# Altium schematic symbol library Ic%.SchLib: 452 symbols (part 1 of 12)
Pins are listed as number, name and electrical type; pins without a type are passive.

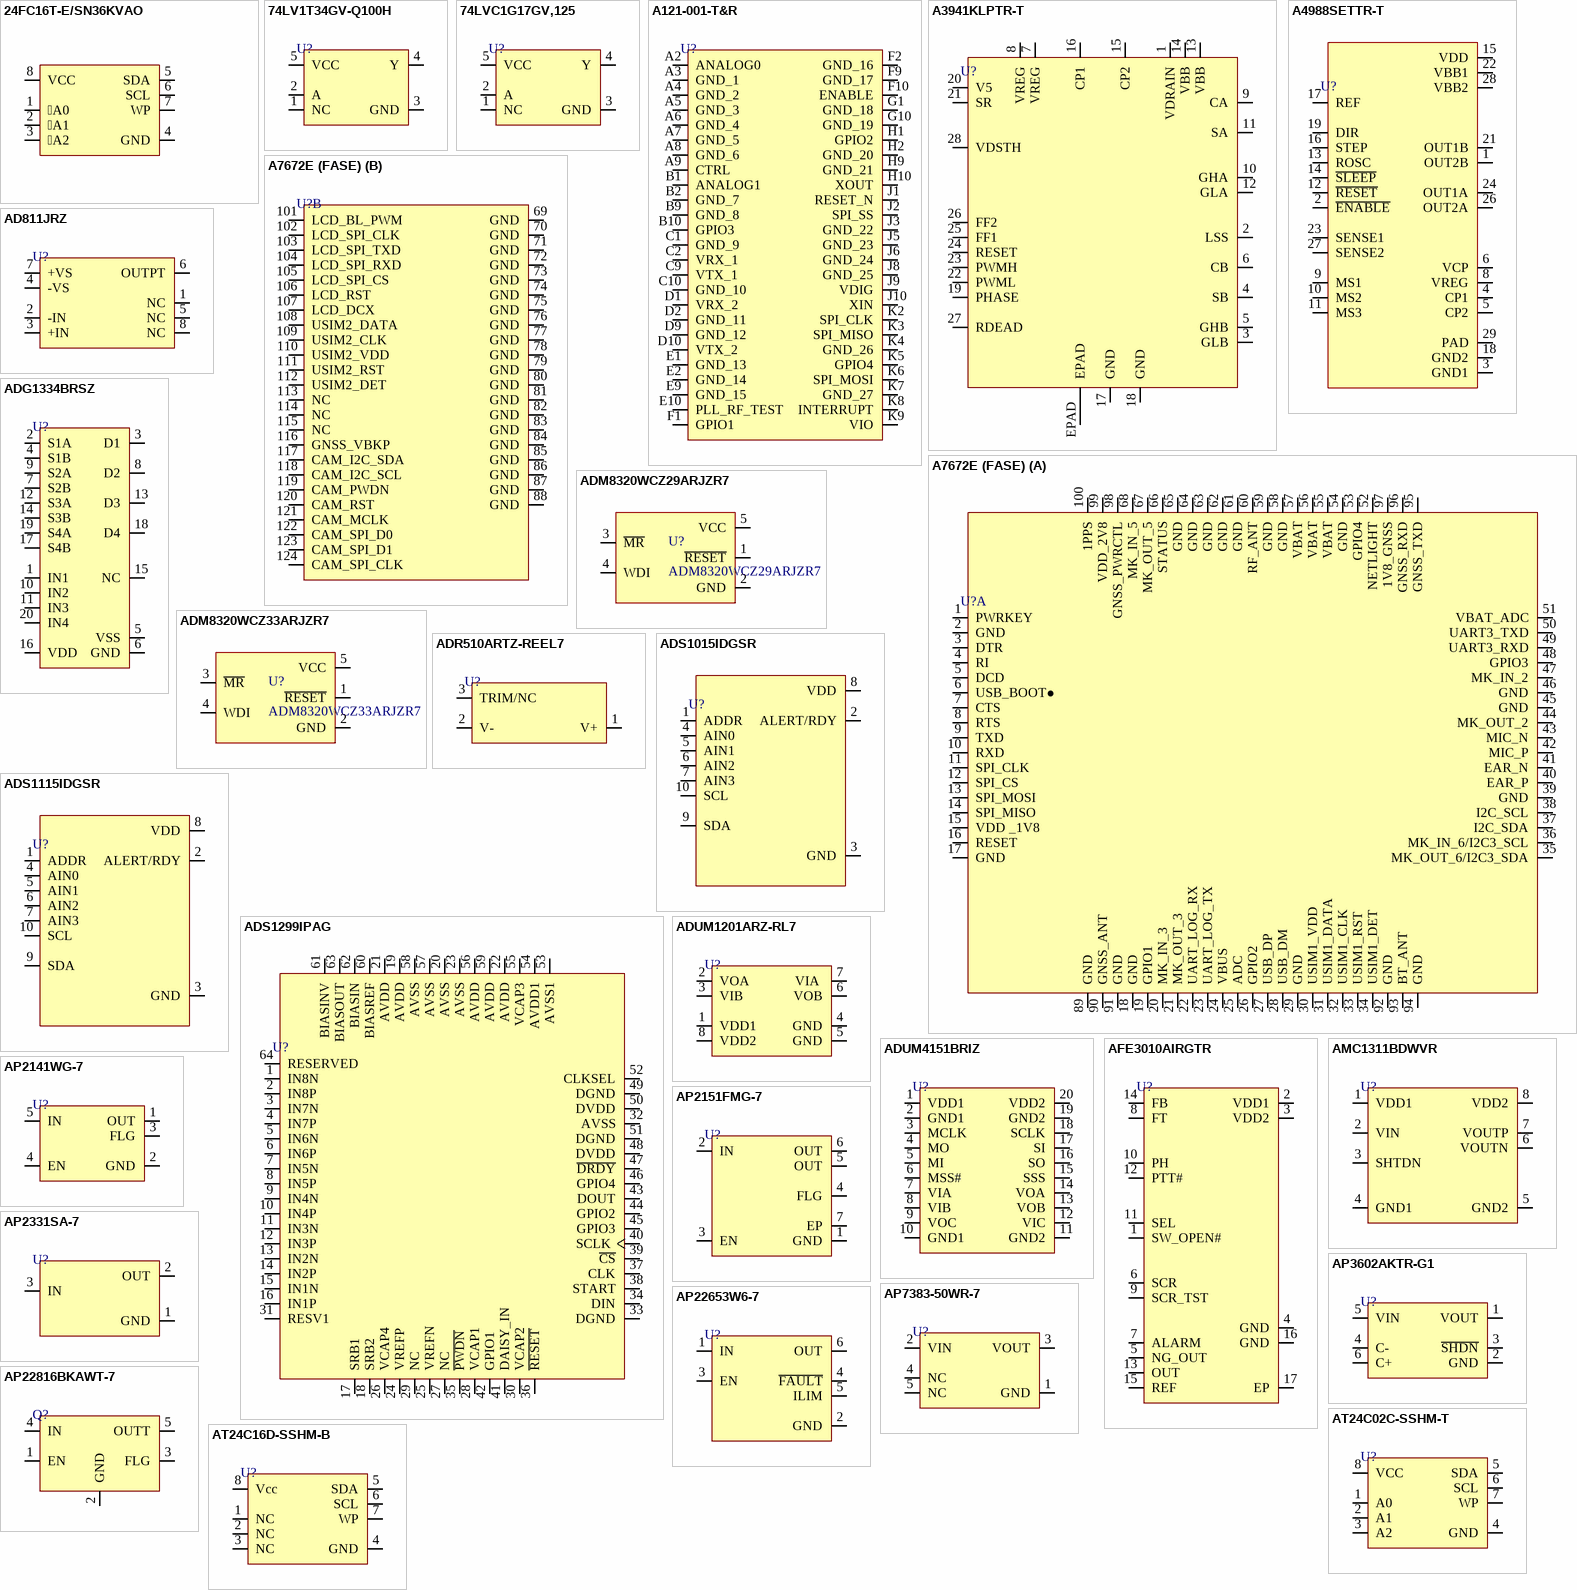
[diagram p0: symbols 24FC16T-E/SN36KVAO to AT24C16D-SSHM-B]

## 24FC16T-E/SN36KVAO
designator U?
IC EEPROM 16KBIT I2C 1MHZ 8SOIC; Item Type: IC; Supplier: DigiKey; Supplier Part Number: 150-24FC16T-E/SN36KVAOTR-ND; ComponentLink2URL: https://datasheet.octopart.com/24FC16T-E-SN36KVAO-Microchip-datasheet-138123575.pdf?src-supplier=Augswan; ComponentLink2Description: https://datasheet.octopart.com/24FC16T-E-SN36KVAO-Microchip-datasheet-138123575.pdf?src-supplier=Augswan
footprint SOIC-8(0.154", 3.90mm Width)
pins: 1 A0, 2 A1, 3 A2, 4 GND, 5 SDA, 6 SCL, 7 WP, 8 VCC

## 74LV1T34GV-Q100H
designator U?
IC BUFFER NON-INVERT 5.5V SC-74A; Manufacturer: Nexperia; Manufacturer Part Number: 74LV1T34GV-Q100H; Manufacturer Lifecycle Status: RELEASED FOR SUPPLY; Load Capacitance: 30pF; Max Supply Current: 10µA; Min Supply Voltage: 1.6V; Number of Channels: 1; Operating Supply Voltage: 5V; Propagation Delay: 5.2ns; Schmitt Trigger Input: No; Supplier: Mouser; Supplier Part Number: 771-74LV1T34GV-Q100H; RoHS: Compliant; Item Type: IC; Stock: 5510; Pricing: 1=0.45, 10=0.304, 50=0.249, 100=0.232, 1000=0.168, 10000=0.132 (USD); China RoHS: Compliant; Contact Plating: Tin; Height - Seated (Max): 1.1mm; Length: 2.9mm; Lifecycle Status: Production; Max Operating Temperature: 125°C; Max Supply Voltage: 5.5V; Min Operating Temperature: -40°C; Number of Circuits: 1; Number of Inputs: 1; Number of Terminals: 5; REACH SVHC: Yes; Schedule B: 8542390000, 8542390000|8542390000|8542390000|8542390000|8542390000|8542390000, 8542390000|8542390000|8542390000|8542390000|8542390000|8542390000|8542390000, 8542390000|8542390000|8542390000|8542390000|8542390000|8542390000|8542390000|8542390000; Terminal Pitch: 950µm; Width: 1.5mm; ComponentLink1URL: https://datasheet.octopart.com:443/74LV1T34GV-Q100H-Nexperia-datasheet-140652209.pdf?src-supplier=IHS; ComponentLink1Description: https://datasheet.octopart.com:443/74LV1T34GV-Q100H-Nexperia-datasheet-140652209.pdf?src-supplier=IHS; ComponentLink2URL: https://datasheet.octopart.com:443/74LV1T34GV-Q100H-Nexperia-datasheet-188911814.pdf?src-supplier=TME; ComponentLink2Description: https://datasheet.octopart.com:443/74LV1T34GV-Q100H-Nexperia-datasheet-188911814.pdf?src-supplier=TME
footprint SC-74A
pins: 1 NC, 2 A, 3 GND, 4 Y, 5 VCC

## 74LVC1G17GV,125
designator U?
IC BUFFER SCHMITT TRIGGER 5TSOP; Manufacturer: Nexperia; Manufacturer Part Number: 74LVC1G17GV,125; Number of Channels: 1NUMBER; Supplier: Future Electronics; Supplier Part Number: 9876707; RoHS: Yes; Category: Logic Gates; Stock: 513000; Pricing: 3000=0.0334, 9000=0.0322, 30000=0.031, 60000=0.0303, 120000=0.029 (USD); Pins: 5NUMBER; Packaging: 10Packaging; RoHS Compliant: Yes; ComponentLink1URL: http://www.farnell.com/datasheets/2185283.pdf?src-supplier=Farnell; ComponentLink1Description: http://www.farnell.com/datasheets/2185283.pdf?src-supplier=Farnell; ComponentLink2URL: https://datasheet.octopart.com/74LVC1G17GV%2C125-Nexperia-datasheet-11799833.pdf?src-supplier=Farnell; ComponentLink2Description: https://datasheet.octopart.com/74LVC1G17GV%2C125-Nexperia-datasheet-11799833.pdf?src-supplier=Farnell; ComponentLink3URL: https://assets.nexperia.com/documents/data-sheet/74LVC1G17.pdf?src-supplier=Digikey; ComponentLink3Description: https://assets.nexperia.com/documents/data-sheet/74LVC1G17.pdf?src-supplier=Digikey; ComponentLink4URL: https://datasheet.octopart.com/74LVC1G17GV%2C125-Nexperia-datasheet-116120530.pdf?src-supplier=Future+Electronics; ComponentLink4Description: https://datasheet.octopart.com/74LVC1G17GV%2C125-Nexperia-datasheet-116120530.pdf?src-supplier=Future+Electronics; ComponentLink5URL: https://datasheet.octopart.com/74LVC1G17GV%2C125-Nexperia-datasheet-73818103.pdf?src-supplier=Element14; ComponentLink5Description: https://datasheet.octopart.com/74LVC1G17GV%2C125-Nexperia-datasheet-73818103.pdf?src-supplier=Element14; ComponentLink6URL: https://datasheet.octopart.com/74LVC1G17GV%2C125-NXP-Semiconductors-datasheet-13026859.pdf?src-supplier=Newark; ComponentLink6Description: https://datasheet.octopart.com/74LVC1G17GV%2C125-NXP-Semiconductors-datasheet-13026859.pdf?src-supplier=Newark; LCSC Part Number: C6076; Item Type: IC
footprint SC-74A
pins: 1 NC, 2 A, 3 GND, 4 Y, 5 VCC

## A121-001-T&R
designator U?
RADAR SENSOR SYSTEM-IN-PACKAGE B; Manufacturer: Acconeer; Manufacturer Part Number: A121-001-T&R; Item Type: IC; Supplier: Mouser; Supplier Part Number: 925-A121-001-T&R; RoHS: No; Category: LDO; Stock: 7442; Pricing: 1=13.72, 10=11.57, 50=10.22, 100=8.78, 1000=7.74, 10000=6.41 (USD)
footprint 50-FCCSP (5.2x5.5)
pins: A2 ANALOG0, A3 GND_1, A4 GND_2, A5 GND_3, A6 GND_4, A7 GND_5, A8 GND_6, A9 CTRL, B1 ANALOG1, B2 GND_7, B9 GND_8, B10 GPIO3, C1 GND_9, C2 VRX_1, C9 VTX_1, C10 GND_10, D1 VRX_2, D2 GND_11, D9 GND_12, D10 VTX_2, E1 GND_13, E2 GND_14, E9 GND_15, E10 PLL_RF_TEST, F1 GPIO1, F2 GND_16, F9 GND_17, F10 ENABLE, G1 GND_18, G10 GND_19, H1 GPIO2, H2 GND_20, H9 GND_21, H10 XOUT, J1 RESET_N, J2 SPI_SS, J3 GND_22, J5 GND_23, J6 GND_24, J8 GND_25, J9 VDIG, J10 XIN, K2 SPI_CLK, K3 SPI_MISO, K4 GND_26, K5 GPIO4, K6 SPI_MOSI, K7 GND_27, K8 INTERRUPT, K9 VIO

## A3941KLPTR-T
designator U?
IC MOTOR DRIVER 5.5V-50V 28TSSOP; Manufacturer: Allegro MicroSystems; Manufacturer Part Number: A3941KLPTR-T; Supplier: Digikey; Supplier Part Number: 620-1236-1-ND; RoHS: Yes; Item Type: IC; Stock: 24636; Pricing: 1=3.93, 10=3.534, 25=3.3404, 100=2.8952, 250=2.74668, 500=2.4646, 1000=2.07858 (USD); ComponentLink1URL: https://datasheet.ciiva.com/1949/a3941-datasheet-1949853.pdf?src-supplier=Digikey; ComponentLink1Description: https://datasheet.ciiva.com/1949/a3941-datasheet-1949853.pdf?src-supplier=Digikey; ComponentLink2URL: https://datasheet.ciiva.com/1949/a3941-datasheet-1949853.pdf?src-supplier=Avnet; ComponentLink2Description: https://datasheet.ciiva.com/1949/a3941-datasheet-1949853.pdf?src-supplier=Avnet; ComponentLink3URL: https://datasheet.ciiva.com/15110/getdatasheetpartid-292391-15110112.pdf?src-supplier=Verical; ComponentLink3Description: https://datasheet.ciiva.com/15110/getdatasheetpartid-292391-15110112.pdf?src-supplier=Verical; ComponentLink4URL: https://datasheet.ciiva.com/6807/1481248-6807185.pdf?src-supplier=Newark; ComponentLink4Description: https://datasheet.ciiva.com/6807/1481248-6807185.pdf?src-supplier=Newark
footprint 28-TSSOP-EP
pins: 1 VDRAIN, 2 LSS, 3 GLB, 4 SB, 5 GHB, 6 CB, 7 VREG, 8 VREG, 9 CA, 10 GHA, 11 SA, 12 GLA, 13 VBB, 14 VBB, 15 CP2, 16 CP1, 17 GND, 18 GND, 19 PHASE, 20 V5, 21 SR, 22 PWML, 23 PWMH, 24 RESET, 25 FF1, 26 FF2, 27 RDEAD, 28 VDSTH, EPAD

## A4988SETTR-T
designator U?
IC MTR DRVR BIPOLAR 3-5.5V 28QFN; Manufacturer: Allegro MicroSystems; Manufacturer Part Number: A4988SETTR-T; Forward Current: 1A; Supplier: Digikey; LCSC Part Number: C38437; RoHS: Yes; Item Type: IC; Stock: 15564; Pricing: 1=2.96, 10=2.213, 25=2.0264, 100=1.8214, 250=1.7236, 500=1.66468 (USD); Length: 4.5mm; Height: 1mm; ComponentLink1URL: https://datasheet.ciiva.com/15109/getdatasheetpartid-557828-15109654.pdf?src-supplier=Verical; ComponentLink1Description: https://datasheet.ciiva.com/15109/getdatasheetpartid-557828-15109654.pdf?src-supplier=Verical; ComponentLink2URL: https://datasheet.ciiva.com/1608/a4988-datasheet-1608449.pdf?src-supplier=Newark; ComponentLink2Description: https://datasheet.ciiva.com/1608/a4988-datasheet-1608449.pdf?src-supplier=Newark; ComponentLink3URL: https://datasheet.ciiva.com/1147/1481258-1147170.pdf?src-supplier=Element14; ComponentLink3Description: https://datasheet.ciiva.com/1147/1481258-1147170.pdf?src-supplier=Element14; ComponentLink4URL: https://datasheet.ciiva.com/3229/a4988-datasheet-3229532.pdf?src-supplier=Avnet; ComponentLink4Description: https://datasheet.ciiva.com/3229/a4988-datasheet-3229532.pdf?src-supplier=Avnet
footprint WQFN-28-EP(5x5)
pins: 1 OUT2B, 2 ~{ENABLE}, 3 GND1, 4 CP1, 5 CP2, 6 VCP, 8 VREG, 9 MS1, 10 MS2, 11 MS3, 12 ~{RESET}, 13 ROSC, 14 ~{SLEEP}, 15 VDD, 16 STEP, 17 REF, 18 GND2, 19 DIR, 21 OUT1B, 22 VBB1, 23 SENSE1, 24 OUT1A, 26 OUT2A, 27 SENSE2, 28 VBB2, 29 PAD

## A7672E (FASE)
designator U?
RF TXRX MODULE CELLULAR SMD; Manufacturer: SIMCom Wireless Solutions Limited; Manufacturer Part Number: A7672E (FASE); Item Type: IC Module; Package: 80-SMD Module; ComponentLink1Description: Digikey; ComponentLink1URL: https://www.digikey.com/en/products/detail/simcom-wireless-solutions-limited/A7672E-FASE/15841437
footprint A7672E (FASE)
part A pins: 1 PWRKEY, 2 GND, 3 DTR, 4 RI, 5 DCD, 6 USB_BOOT●, 7 CTS, 8 RTS, 9 TXD, 10 RXD, 11 SPI_CLK, 12 SPI_CS, 13 SPI_MOSI, 14 SPI_MISO, 15 VDD _1V8, 16 RESET, 17 GND, 18 GND, 19 GPIO1, 20 MK_IN_3, 21 MK_OUT_3, 22 UART_LOG_RX, 23 UART_LOG_TX, 24 VBUS, 25 ADC, 26 GPIO2, 27 USB_DP, 28 USB_DM, 29 GND, 30 USIM1_VDD, 31 USIM1_DATA, 32 USIM1_CLK, 33 USIM1_RST, 34 USIM1_DET, 35 MK_OUT_6/I2C3_SDA, 36 MK_IN_6/I2C3_SCL, 37 I2C_SDA, 38 I2C_SCL, 39 GND, 40 EAR_P, 41 EAR_N, 42 MIC_P, 43 MIC_N, 44 MK_OUT_2, 45 GND, 46 GND, 47 MK_IN_2, 48 GPIO3, 49 UART3_RXD, 50 UART3_TXD, 51 VBAT_ADC, 52 NETLIGHT, 53 GPIO4, 54 GND, 55 VBAT, 56 VBAT, 57 VBAT, 58 GND, 59 GND, 60 RF_ANT, 61 GND, 62 GND, 63 GND, 64 GND, 65 GND, 66 STATUS, 67 MK_OUT_5, 68 MK_IN_5, 89 GND, 90 GNSS_ANT, 91 GND, 92 GND, 93 BT_ANT, 94 GND, 95 GNSS_TXD, 96 GNSS_RXD, 97 1V8_GNSS, 98 GNSS_PWRCTL, 99 VDD_2V8, 100 1PPS
part B pins: 69 GND, 70 GND, 71 GND, 72 GND, 73 GND, 74 GND, 75 GND, 76 GND, 77 GND, 78 GND, 79 GND, 80 GND, 81 GND, 82 GND, 83 GND, 84 GND, 85 GND, 86 GND, 87 GND, 88 GND, 101 LCD_BL_PWM, 102 LCD_SPI_CLK, 103 LCD_SPI_TXD, 104 LCD_SPI_RXD, 105 LCD_SPI_CS, 106 LCD_RST, 107 LCD_DCX, 108 USIM2_DATA, 109 USIM2_CLK, 110 USIM2_VDD, 111 USIM2_RST, 112 USIM2_DET, 113 NC, 114 NC, 115 NC, 116 GNSS_VBKP, 117 CAM_I2C_SDA, 118 CAM_I2C_SCL, 119 CAM_PWDN, 120 CAM_RST, 121 CAM_MCLK, 122 CAM_SPI_D0, 123 CAM_SPI_D1, 124 CAM_SPI_CLK

## AD811JRZ
designator U?
Video Amplifier, 1, 140 Mhz, 2500 V/ S, 0 C, 70 C, 100 Ma Rohs Compliant: Yes; Manufacturer: Analog Devices; Manufacturer Part Number: AD811JRZ; Item Type: IC; Supplier: Mouser; Supplier Part Number: 584-AD811JRZ; RoHS: Yes; Category: Amplifiers - Op Amps, Buffer, Instrumentation; Stock: 196; Pricing: 1=12.99, 10=11.94, 25=11.45, 50=11.45, 98=10.09, 100=10.09, 1000=8.97, 10000=8.97 (USD); ComponentLink1URL: https://datasheet.ciiva.com/1134/1610772-1134928.pdf?src-supplier=Element14; ComponentLink1Description: https://datasheet.ciiva.com/1134/1610772-1134928.pdf?src-supplier=Element14; ComponentLink2URL: https://datasheet.ciiva.com/15130/getdatasheetpartid-72911-15130233.pdf?src-supplier=Verical; ComponentLink2Description: https://datasheet.ciiva.com/15130/getdatasheetpartid-72911-15130233.pdf?src-supplier=Verical; ComponentLink3URL: https://datasheet.ciiva.com/1823/ad811-1823927.pdf?src-supplier=Digi-Key; ComponentLink3Description: https://datasheet.ciiva.com/1823/ad811-1823927.pdf?src-supplier=Digi-Key; ComponentLink4URL: https://datasheet.ciiva.com/2972/ad811-2972994.pdf?src-supplier=Avnet; ComponentLink4Description: https://datasheet.ciiva.com/2972/ad811-2972994.pdf?src-supplier=Avnet; LCSC Part Number: *
footprint SOIC-8(0.154", 3.90mm Width)
pins: 1 NC, 2 -IN, 3 +IN, 4 -VS, 5 NC, 6 OUTPT, 7 +VS, 8 NC

## ADG1334BRSZ
designator U?
IC SW SPST-NO/NCX4 200OHM 20SSOP; Manufacturer: Analog Devices; Manufacturer Part Number: ADG1334BRSZ; Throw Configuration: 256Throw Configuration; Drain to Source Resistance: 325R; Supplier: Mouser; LCSC Part Number: C31704; RoHS: Yes; Item Type: IC; Stock: 471; Pricing: 1=5.86, 10=4.23, 50=4.23, 100=3.04, 1000=2.75, 10000=2.68 (USD); Lead Free: 5698LeadFree; ComponentLink1URL: https://datasheet.ciiva.com/16229/adg1334-279279-16229985.pdf?src-supplier=Mouser; ComponentLink1Description: https://datasheet.ciiva.com/16229/adg1334-279279-16229985.pdf?src-supplier=Mouser; ComponentLink2URL: https://datasheet.ciiva.com/2978/adg1334-2978530.pdf?src-supplier=Avnet; ComponentLink2Description: https://datasheet.ciiva.com/2978/adg1334-2978530.pdf?src-supplier=Avnet; ComponentLink3URL: https://datasheet.ciiva.com/15127/getdatasheetpartid-186987-15127378.pdf?src-supplier=Verical; ComponentLink3Description: https://datasheet.ciiva.com/15127/getdatasheetpartid-186987-15127378.pdf?src-supplier=Verical; ComponentLink4URL: https://datasheet.ciiva.com/1170/208077-1170615.pdf?src-supplier=Element14; ComponentLink4Description: https://datasheet.ciiva.com/1170/208077-1170615.pdf?src-supplier=Element14; ComponentLink5URL: https://datasheet.ciiva.com/6638/adg1334-6638827.pdf?src-supplier=Digikey; ComponentLink5Description: https://datasheet.ciiva.com/6638/adg1334-6638827.pdf?src-supplier=Digikey; ComponentLink6URL: https://datasheet.ciiva.com/5797/adg1334-5797183.pdf?src-supplier=Farnell; ComponentLink6Description: https://datasheet.ciiva.com/5797/adg1334-5797183.pdf?src-supplier=Farnell
footprint SSOP-20-208mil
pins: 1 IN1 "Logic Control Input.", 2 S1A "Source Terminal. Can be an input or output.", 3 D1 "Drain Terminal. Can be an input or output.", 4 S1B "Source Terminal. Can be an input or output.", 5 VSS "Most Negative Power Supply Potential in Dual Supplies. In  single-supply applications, it can be connected to ground.", 6 GND "Ground (0 V) Reference.", 7 S2B "Source Terminal. Can be an input or output.", 8 D2 "Drain Terminal. Can be an input or output.", 9 S2A "Source Terminal. Can be an input or output.", 10 IN2 "Logic Control Input.", 11 IN3 "Logic Control Input.", 12 S3A "Source Terminal. Can be an input or output.", 13 D3 "Drain Terminal. Can be an input or output.", 14 S3B "Source Terminal. Can be an input or output.", 15 NC "No Connect.", 16 VDD "Most Positive Power Supply Potential.", 17 S4B "Source Terminal. Can be an input or output.", 18 D4 "Drain Terminal. Can be an input or output.", 19 S4A "Source Terminal. Can be an input or output.", 20 IN4 "Logic Control Input."

## ADM8320WCZ29ARJZR7
designator U?
140ms Active Low 900mV~5.5V 1 SOT-23-5 Supervisors RoHS; Manufacturer: Analog Devices; Price: None; Manufacturer Part Number: ADM8320WCZ29ARJZR7; Value: -; Package: SOT-23-5; LCSC Part Number: C658543
footprint SOT95P280X145-5N
pins: 1 ~{RESET}, 2 GND (power), 3 ~{MR}, 4 WDI, 5 VCC (power)

## ADM8320WCZ33ARJZR7
designator U?
140ms Active Low 900mV~5.5V 1 SOT-23-5 Supervisors RoHS; Manufacturer: Analog Devices; Price: None; Manufacturer Part Number: ADM8320WCZ33ARJZR7; Value: -; Package: SOT-23-5; LCSC Part Number: C658544
footprint SOT95P280X145-5N
pins: 1 ~{RESET}, 2 GND (power), 3 ~{MR}, 4 WDI, 5 VCC (power)

## ADR510ARTZ-REEL7
designator U?
IC VREF SHUNT 0.35% SOT23-3; Manufacturer: Analog Devices; Manufacturer Part Number: ADR510ARTZ-REEL7; Item Type: Voltage References; Supplier: Mouser; Supplier Part Number: 584-ADR510ARTZ-R7; RoHS: Yes; Stock: 28687; Pricing: 1=2.35, 10=2, 50=2, 100=1.69, 1000=1.14, 10000=1.03 (USD); ComponentLink1URL: https://datasheet.ciiva.com/1172/81404-1172803.pdf?src-supplier=Element14; ComponentLink1Description: https://datasheet.ciiva.com/1172/81404-1172803.pdf?src-supplier=Element14; ComponentLink2URL: https://datasheet.ciiva.com/15373/adr510-279234-15373251.pdf?src-supplier=Mouser; ComponentLink2Description: https://datasheet.ciiva.com/15373/adr510-279234-15373251.pdf?src-supplier=Mouser; ComponentLink3URL: https://datasheet.ciiva.com/28474/81404-28474005.pdf?src-supplier=Element14; ComponentLink3Description: https://datasheet.ciiva.com/28474/81404-28474005.pdf?src-supplier=Element14; ComponentLink4URL: https://datasheet.ciiva.com/3235/adr510-3235758.pdf?src-supplier=Avnet; ComponentLink4Description: https://datasheet.ciiva.com/3235/adr510-3235758.pdf?src-supplier=Avnet; ComponentLink5URL: https://datasheet.ciiva.com/3235/adr510-3235291.pdf?src-supplier=Avnet; ComponentLink5Description: https://datasheet.ciiva.com/3235/adr510-3235291.pdf?src-supplier=Avnet; ComponentLink6URL: https://datasheet.ciiva.com/2005/adr510-2005628.pdf?src-supplier=Digikey; ComponentLink6Description: https://datasheet.ciiva.com/2005/adr510-2005628.pdf?src-supplier=Digikey; ComponentLink7URL: https://datasheet.ciiva.com/2005/adr510-2005629.pdf?src-supplier=Digikey; ComponentLink7Description: https://datasheet.ciiva.com/2005/adr510-2005629.pdf?src-supplier=Digikey; ComponentLink8URL: https://datasheet.ciiva.com/2005/adr510-2005630.pdf?src-supplier=Digikey; ComponentLink8Description: https://datasheet.ciiva.com/2005/adr510-2005630.pdf?src-supplier=Digikey
footprint SOT-23 (TRANS NPN 40V 0.6A SOT23)
pins: 1 V+, 2 V-, 3 TRIM/NC

## ADS1015IDGSR
designator U?
IC ADC 12BIT SIGMA-DELTA 10VSSOP; Manufacturer: Texas Instruments; Manufacturer Part Number: ADS1015IDGSR; Operating Supply Voltage: 3.3V; Min Supply Voltage: 2V; Max Supply Voltage: 5.5V; Interface: I2C; Number of Converters: 1; Resolution: 12b; Number of Bits: 12; Sampling Rate: 3.3KS/s; Polarity: Bipolar; Integral Nonlinearity (INL): 0.5LSB; Supply Type: Single; Number of Inputs: 4; Power Dissipation: 900uW; Supplier: Mouser; Supplier Part Number: 595-ADS1015IDGSR; RoHS: Yes; Item Type: IC; Stock: 6946; Pricing: 1=2.68, 10=2.28, 50=2.28, 100=1.98, 1000=1.42, 10000=1.32 (USD); Case/Package: VSSOP; Pins: 10; Contact Plating: Gold; Min Operating Temperature: -40°C; Max Operating Temperature: 125°C; Packaging: Tape and Reel; Package Quantity: 2500; Number of A/D Converters: 1; Number of Elements: 1; Conversion Rate: 3.3KS/s; Max Supply Voltage (DC): 5.5V; Min Supply Voltage (DC): 2V; Series: -; Length: 3mm; Width: 3mm; Height: 1.07mm; Thickness: 1.02mm; Reach SVHC Compliant: No; Lead Free: Lead Free; RoHS Compliant: Yes; ComponentLink1URL: https://datasheet.ciiva.com/14260/sbas473c-14260076.pdf?src-supplier=Avnet; ComponentLink1Description: https://datasheet.ciiva.com/14260/sbas473c-14260076.pdf?src-supplier=Avnet; ComponentLink2URL: https://datasheet.ciiva.com/6662/ads1013-6662716.pdf?src-supplier=Digikey; ComponentLink2Description: https://datasheet.ciiva.com/6662/ads1013-6662716.pdf?src-supplier=Digikey; LCSC Part Number: C193969
footprint VSSOP-10
pins: 1 ADDR, 2 ALERT/RDY, 3 GND, 4 AIN0, 5 AIN1, 6 AIN2, 7 AIN3, 8 VDD, 9 SDA, 10 SCL

## ADS1115IDGSR
designator U?
IC ADC 16BIT SIGMA-DELTA 10VSSOP; Manufacturer: Texas Instruments; Manufacturer Part Number: ADS1115IDGSR; Interface: I2C; Number of Bits: 16; Sampling Rate: 860S/s; Number of A/D Converters: 1; Resolution: 16b; Polarity: Bipolar; Min Supply Voltage: 2V; Max Supply Voltage: 5.5V; Supply Type: Single; Conversion Rate: 0.86KS/s; Number of Inputs: 4; Integral Nonlinearity (INL): 1LSB; Power Dissipation: 900uW; Nominal Supply Current: 150uA; Number of Channels: 2; Supplier: Mouser; Supplier Part Number: 595-ADS1115IDGSR; RoHS: Yes; Category: Analog to Digital Converters (ADCs); Stock: 5925; Pricing: 1=5.44, 10=4.76, 50=4.76, 100=4.01, 1000=2.88, 10000=2.78 (USD); Case/Package: VSSOP; Pins: 10; Contact Plating: Gold; Min Operating Temperature: -40°C; Max Operating Temperature: 125°C; Package Quantity: 2500; Packaging: Tape and Reel; Number of Converters: 1; Max Supply Voltage (DC): 5.5V; Min Supply Voltage (DC): 2V; Series: -; Length: 3mm; Width: 3mm; Height: 1.07mm; Thickness: 1.02mm; Reach SVHC Compliant: No; Lead Free: Lead Free; RoHS Compliant: Yes; ComponentLink1URL: https://datasheet.ciiva.com/4031/47725463s8438921n7713-4031028.pdf?src-supplier=Arrow+Electronics; ComponentLink1Description: https://datasheet.ciiva.com/4031/47725463s8438921n7713-4031028.pdf?src-supplier=Arrow+Electronics; LCSC Part Number: C37593; Item Type: IC
footprint VSSOP-10
pins: 1 ADDR, 2 ALERT/RDY, 3 GND, 4 AIN0, 5 AIN1, 6 AIN2, 7 AIN3, 8 VDD, 9 SDA, 10 SCL

## ADS1299IPAG
designator U?
IC AFE 8 CHAN 24BIT 64TQFP; Manufacturer: Texas Instruments; Manufacturer Part Number: ADS1299IPAG; Power Consumption: 41mW; Supplier: Mouser; LCSC Part Number: C476817; RoHS: Yes; Item Type: IC; Stock: 1661; Pricing: 1=77.46, 10=64.33, 50=60.74, 100=56.93, 1000=56.93, 10000=56.93 (USD); Length: 10mm; Width: 10mm; Height: 1.2mm; Thickness: 1mm; Lead Free: 5697LeadFree; ComponentLink1URL: https://datasheet.ciiva.com/13063/ads1299-224171-13063283.pdf?src-supplier=Mouser; ComponentLink1Description: https://datasheet.ciiva.com/13063/ads1299-224171-13063283.pdf?src-supplier=Mouser; ComponentLink2URL: https://datasheet.ciiva.com/26913/getdatasheetpartid-563195-26913237.pdf?src-supplier=Verical; ComponentLink2Description: https://datasheet.ciiva.com/26913/getdatasheetpartid-563195-26913237.pdf?src-supplier=Verical; ComponentLink3URL: https://datasheet.ciiva.com/6668/ads1299-6668469.pdf?src-supplier=Digikey; ComponentLink3Description: https://datasheet.ciiva.com/6668/ads1299-6668469.pdf?src-supplier=Digikey
footprint 64-TQFP (10x10)
pins: 1 IN8N "Differential analog negative input 8", 2 IN8P "Differential analog positive input 8", 3 IN7N "Differential analog negative input 7", 4 IN7P "Differential analog positive input 7", 5 IN6N "Differential analog negative input 6", 6 IN6P "Differential analog positive input 6", 7 IN5N "Differential analog negative input 5", 8 IN5P "Differential analog positive input 5", 9 IN4N "Differential analog negative input 4", 10 IN4P "Differential analog positive input 4", 11 IN3N "Differential analog negative input 3", 12 IN3P "Differential analog positive input 3", 13 IN2N "Differential analog negative input 2", 14 IN2P "Differential analog positive input 2", 15 IN1N "Differential analog negative input 1", 16 IN1P "Differential analog positive input 1", 17 SRB1 "Patient stimulus, reference, and bias signal 1", 18 SRB2 "Patient stimulus, reference, and bias signal 2", 19 AVDD "Analog supply", 20 AVSS "Analog ground", 21 AVDD "Analog supply", 22 AVDD "Analog supply", 23 AVSS "Analog ground", 24 VREFP "Positive reference voltage", 25 VREFN "Negative reference voltage", 26 VCAP4 "Analog bypass capacitor", 27 NC "No connection", 28 VCAP1 "Analog bypass capacitor", 29 NC "No connection", 30 VCAP2 "Analog bypass capacitor", 31 RESV1 "Reserved for future use. Must tie to logic low (DGND)", 32 AVSS "Analog ground", 33 DGND "Digital ground", 34 DIN "SPI data in", 35 ~{PWDN} "Power-down; active low", 36 ~{RESET} "System reset; active low", 37 CLK "Master clock input", 38 START "Start conversion", 39 ~{CS} "SPI chip select; active low", 40 SCLK "SPI clock", 41 DAISY_IN "Daisy-chain input", 42 GPIO1 "General-purpose input/output pin", 43 DOUT "SPI data out", 44 GPIO2 "General-purpose input/output pin", 45 GPIO3 "GPIO3 in normal mode", 46 GPIO4 "GPIO4 in normal mode", 47 ~{DRDY} "Data ready; active low", 48 DVDD "Digital power supply", 49 DGND "Digital ground", 50 DVDD "Digital power supply", 51 DGND "Digital ground", 52 CLKSEL "Master clock select", 53 AVSS1 "Analog ground", 54 AVDD1 "Analog supply", 55 VCAP3 "Analog bypass capacitor", 56 AVDD "Analog supply", 57 AVSS "Analog ground", 58 AVSS "Charge pump analog ground", 59 AVDD "Charge pump analog supply", 60 BIASREF "Bias drive noninverting input", 61 BIASINV "Bias drive inverting input", 62 BIASIN "Bias drive input to MUX", 63 BIASOUT "Bias drive output", 64 RESERVED "Leave as open circuit"

## ADUM1201ARZ-RL7
designator U?
DGTL ISO 2500VRMS 2CH GP 8SOIC; Manufacturer: Analog Devices; Manufacturer Part Number: ADUM1201ARZ-RL7; Number of Channels: 2; Propagation Delay: 150ns; Min Supply Voltage: 2.7V; Max Supply Voltage: 5.5V; Data Rate: 25Mbps; Channel Type: Unidirectional; Polarity: Bidirectional; Operating Supply Current: 600uA; ESD Protection: No; Output Current: 35mA; Pulse Width Distortion (PWD): 40ns; Voltage: 5V; Approvals: UL,CSA,VDE; Item Type: IC; Supplier: Mouser; Supplier Part Number: 584-ADUM1201ARZ-R7; RoHS: Yes; Category: Interface ICs; Stock: 39953; Pricing: 1=4.14, 10=3.72, 50=3.72, 100=3.05, 1000=2.19, 10000=2.08 (USD); Case/Package: R; Pins: 8; Weight: 0.019048oz; Min Operating Temperature: -40°C; Max Operating Temperature: 125°C; Packaging: Tape and Reel; Turn-On Delay Time: 150ns; Isolated Power: No; Type: General Purpose; Max Supply Current: 600uA; Series: iCoupler®; Radiation Hardening: No; Lead Free: Contains Lead; RoHS Compliant: Yes; ComponentLink1URL: https://datasheet.ciiva.com/15119/getdatasheetpartid-121048-15119389.pdf?src-supplier=Verical; ComponentLink1Description: https://datasheet.ciiva.com/15119/getdatasheetpartid-121048-15119389.pdf?src-supplier=Verical; ComponentLink2URL: https://datasheet.ciiva.com/3149/adum1200-1201-3149740.pdf?src-supplier=Avnet; ComponentLink2Description: https://datasheet.ciiva.com/3149/adum1200-1201-3149740.pdf?src-supplier=Avnet; ComponentLink3URL: https://datasheet.ciiva.com/15367/adum1200-1201-279454-15367752.pdf?src-supplier=Mouser; ComponentLink3Description: https://datasheet.ciiva.com/15367/adum1200-1201-279454-15367752.pdf?src-supplier=Mouser; LCSC Part Number: C9669
footprint SOIC-8(0.154", 3.90mm Width)
pins: 1 VDD1, 2 VOA, 3 VIB  , 4 GND, 5 GND, 6 VOB, 7 VIA , 8 VDD2

## ADUM4151BRIZ
designator U?
DGTL ISOLTR 5KV 7CH SPI 20-SOIC; Manufacturer: Analog Devices; Manufacturer Part Number: ADUM4151BRIZ; Manufacturer Lifecycle Status: PRODUCTION; Item Type: IC; Channel Type: Unidirectional; Data Rate: 34Mbps; Isolated Power: No; Max Input Current: 18mA; Max Power Dissipation: 2.4W; Max Supply Voltage: 5.5V; Min Supply Voltage: 3V; Number of Channels: 7; Polarity: Bidirectional; Propagation Delay: 14ns; Pulse Width Distortion (PWD): 2ns; Rise Time: 2.5ns; Supplier: Arrow Electronics; LCSC Part Number: C660954; RoHS: Compliant; Stock: 15; Pricing: 62=7.191, 124=6.824, 279=6.74 (USD); Case/Package: SOIC; Depth: 2.44mm; Height: 2.64mm; Interface: SPI; Isolation Voltage: 5kV; Lead Free: Contains Lead; Length: 15.4mm; Lifecycle Status: Production; Max Operating Temperature: 125°C; Min Operating Temperature: -40°C; Mounting Technology: Surface Mount; Pins: 20; Schedule B: 8542390000, 8542390000|8542390000|8542390000|8542390000|8542390000|8542390000|8542390000|8542390000|8542390000|8542390000|8542390000|8542390000|8542390000|8542390000|8542390000|8542390000|8542390000|8542390000|8542390000|8542390000|8542390000|8542390000|8542390000|85; Turn-On Delay Time: 14ns; Weight: 800.987426mg; Width: 7.6mm; ComponentLink1URL: https://octopart.com:443/opatz8j6/c1?t=qGup1W_oBSPcG--iJc4zhXYaAMGcTXzYaxoxPo0HrFuqKJ8NS3XBQL2t5GeTOrjnzAiWj4fWW59-InhBeS5ARLwXR9-CHwOr-TK-vGiUfgZurmNtEGh60lBxqOCmde21OAyXD_79k6b3Ox7mJLOMI69Oq5tQ-gbSpeSv54Vsr6vhNVZ_6f_FBK5DFgVZMWLT-wT60cBOJ0tSznrAe3-6Yi-aSdOpRLVW5ryzTyM44QzPx3wRz9cQx9L3ALJP0EyTwFcv31dMyeZSUSxmT-9n9F2WltHHeCOdJqmYWuTV1WBcvwcyezqS1eRb&src-supplier=Analog+Devices; ComponentLink1Description: https://octopart.com:443/opatz8j6/c1?t=qGup1W_oBSPcG--iJc4zhXYaAMGcTXzYaxoxPo0HrFuqKJ8NS3XBQL2t5GeTOrjnzAiWj4fWW59-InhBeS5ARLwXR9-CHwOr-TK-vGiUfgZurmNtEGh60lBxqOCmde21OAyXD_79k6b3Ox7mJLOMI69Oq5tQ-gbSpeSv54Vsr6vhNVZ_6f_FBK5DFgVZMWLT-wT60cBOJ0tSznrAe3-6Yi-aSdOpRLVW5ryzTyM44QzPx3wRz9cQx9L3ALJP0EyTwFcv31dMyeZSUSxmT-9n9F2WltHHeCOdJqmYWuTV1WBcvwcyezqS1eRb&src-supplier=Analog+Devices; ComponentLink2URL: https://datasheet.octopart.com:443/ADUM4151BRIZ-Analog-Devices-datasheet-32031388.pdf?src-supplier=Analog+Devices; ComponentLink2Description: https://datasheet.octopart.com:443/ADUM4151BRIZ-Analog-Devices-datasheet-32031388.pdf?src-supplier=Analog+Devices; ComponentLink3URL: https://datasheet.octopart.com:443/ADUM4151BRIZ-Analog-Devices-datasheet-155132992.pdf?src-supplier=element14+APAC; ComponentLink3Description: https://datasheet.octopart.com:443/ADUM4151BRIZ-Analog-Devices-datasheet-155132992.pdf?src-supplier=element14+APAC; ComponentLink4URL: https://datasheet.octopart.com:443/ADUM4151BRIZ-Analog-Devices-datasheet-39075007.pdf?src-supplier=Newark; ComponentLink4Description: https://datasheet.octopart.com:443/ADUM4151BRIZ-Analog-Devices-datasheet-39075007.pdf?src-supplier=Newark; ComponentLink5URL: https://datasheet.octopart.com:443/ADUM4151BRIZ-Analog-Devices-datasheet-34433195.pdf?src-supplier=Newark; ComponentLink5Description: https://datasheet.octopart.com:443/ADUM4151BRIZ-Analog-Devices-datasheet-34433195.pdf?src-supplier=Newark; ComponentLink6URL: https://sigma.octopart.com:443/155132993/technical_drawing/Analog-Devices-ADUM4151BRIZ.pdf?src-supplier=Upverter; ComponentLink6Description: https://sigma.octopart.com:443/155132993/technical_drawing/Analog-Devices-ADUM4151BRIZ.pdf?src-supplier=Upverter; ComponentLink7URL: http://sigma.octopart.com:80/conflict_mineral_statement/Analog-Devices-company-33.pdf?src-supplier=Compliance+Statements; ComponentLink7Description: http://sigma.octopart.com:80/conflict_mineral_statement/Analog-Devices-company-33.pdf?src-supplier=Compliance+Statements; ComponentLink8URL: https://octopart.com:443/opatz8j6/c1?t=-zuXzVPEif_oBOBz7mrKPXpwWpUbZyB3b-5gW-5dlJhHF72wdTzRfVpyfGTJblaM7IAHJmSKMSiooT2ReCf8cLMR9vGSAKLMIed9YImrucLmmdfP9yCJWnCCrBPEI21wskbWC7pG-qeM6rysXQDCKOZXUmpZGSozPQy54PkdlKq0qYAZxeRL_ck5zPm9l0FnKkugaBla7BFZd9ay3dmyCwfR8LWzrnIe1wkJ5xvtf7NOIoEq-xu--yn1Hkx5IUluIi2QOdxXOsHMV_2ni7WwiZAPY5lkOvy13CqkEzRtrU-6e5frNiJr9e5H&src-supplier=Compliance+Statements; ComponentLink8Description: https://octopart.com:443/opatz8j6/c1?t=-zuXzVPEif_oBOBz7mrKPXpwWpUbZyB3b-5gW-5dlJhHF72wdTzRfVpyfGTJblaM7IAHJmSKMSiooT2ReCf8cLMR9vGSAKLMIed9YImrucLmmdfP9yCJWnCCrBPEI21wskbWC7pG-qeM6rysXQDCKOZXUmpZGSozPQy54PkdlKq0qYAZxeRL_ck5zPm9l0FnKkugaBla7BFZd9ay3dmyCwfR8LWzrnIe1wkJ5xvtf7NOIoEq-xu--yn1Hkx5IUluIi2QOdxXOsHMV_2ni7WwiZAPY5lkOvy13CqkEzRtrU-6e5frNiJr9e5H&src-supplier=Compliance+Statements
footprint SOIC-20-300mil
pins: 1 VDD1, 2 GND1, 3 MCLK, 4 MO, 5 MI, 6 MSS#, 7 VIA, 8 VIB, 9 VOC, 10 GND1, 11 GND2, 12 VIC, 13 VOB, 14 VOA, 15 SSS, 16 SO, 17 SI, 18 SCLK, 19 GND2, 20 VDD2

## AFE3010AIRGTR
designator U?
IC GRND FAULT CIRC INTER 16-VQFN; Manufacturer: Texas Instruments; Manufacturer Part Number: AFE3010AIRGTR; Supplier: Mouser; LCSC Part Number: C17533396; RoHS: Yes; Item Type: IC; Stock: 1960; Pricing: 1=1.66, 10=1.61, 50=1.61, 100=1.61, 1000=1.23, 10000=0.749 (USD)
footprint VQFN-16(3x3)
pins: 1 SW_OPEN#, 2 VDD1, 3 VDD2, 4 GND, 5 NG_OUT, 6 SCR, 7 ALARM, 8 FT, 9 SCR_TST, 10 PH, 11 SEL, 12 PTT#, 13 OUT, 14 FB, 15 REF, 16 GND, 17 EP

## AMC1311BDWVR
designator U?
IC ISOLATION 8SOIC; Manufacturer: Texas Instruments; Manufacturer Part Number: AMC1311BDWVR; Supplier: Mouser; Supplier Part Number: 595-AMC1311BDWVR; RoHS: Yes; Item Type: IC; Stock: 12443; Pricing: 1=6.01, 10=5.43, 50=5.18, 100=4.5, 1000=3.41, 10000=3.29 (USD); Length: 5.85mm; Width: 7.5mm; Height: 2.8mm; Thickness: 2.65mm; ComponentLink1URL: http://www.ti.com/general/docs/suppproductinfo.tsp?distId=10&amp;gotoUrl=http%3A%2F%2Fwww.ti.com%2Flit%2Fgpn%2Famc1311&src-supplier=Digikey; ComponentLink1Description: http://www.ti.com/general/docs/suppproductinfo.tsp?distId=10&amp;gotoUrl=http%3A%2F%2Fwww.ti.com%2Flit%2Fgpn%2Famc1311&src-supplier=Digikey; ComponentLink2URL: http://www.ti.com/lit/ds/symlink/amc1311.pdf?src-supplier=Digikey; ComponentLink2Description: http://www.ti.com/lit/ds/symlink/amc1311.pdf?src-supplier=Digikey; LCSC Part Number: C783598
footprint SOIC-8-300mil
pins: 1 VDD1, 2 VIN, 3 SHTDN, 4 GND1, 5 GND2, 6 VOUTN, 7 VOUTP, 8 VDD2

## AP2141WG-7
designator U?
IC PWR SWITCH P-CHAN 1:1 SOT25; Manufacturer: Diodes; Manufacturer Part Number: AP2141WG-7; Number of Outputs: 1; Max Supply Voltage: 5.5V; Min Supply Voltage: 2.7V; Interface: On/Off; Max Output current: 500mA; Fault Protection: Over Temperature,Reverse Current; Output Configuration: High Side; Max Current Rating: 800mA; On-state Resistance-Max: 120MR; Supplier: Future Electronics; Supplier Part Number: 6000118; RoHS: Yes; Category: Hot Swap Controllers; Stock: 39000; Pricing: 3000=0.33, 6000=0.325, 9000=0.32, 12000=0.32, 15000=0.31, 30000=0.21, 60000=0.205 (USD); Mounting Technology: Surface Mount; Case/Package: SOT-25; Pins: 5; Min Operating Temperature: -40°C; Max Operating Temperature: 85°C; Package Quantity: 3000; Packaging: Tape and Reel; Voltage: 5.5V; Current: 500mA; Series: -; Number of Switches: 1; Length: 3.1mm; Width: 1.7mm; Height: 1.3mm; Radiation Hardening: No; Lead Free: Lead Free; RoHS Compliant: Yes; ComponentLink1URL: https://datasheet.ciiva.com/15108/getdatasheetpartid-145053-15108419.pdf?src-supplier=Verical; ComponentLink1Description: https://datasheet.ciiva.com/15108/getdatasheetpartid-145053-15108419.pdf?src-supplier=Verical; ComponentLink2URL: https://datasheet.ciiva.com/1962/ap2141-51-1962222.pdf?src-supplier=Digi-Key; ComponentLink2Description: https://datasheet.ciiva.com/1962/ap2141-51-1962222.pdf?src-supplier=Digi-Key; ComponentLink3URL: https://datasheet.ciiva.com/1962/ap2141-51-1962223.pdf?src-supplier=Digi-Key; ComponentLink3Description: https://datasheet.ciiva.com/1962/ap2141-51-1962223.pdf?src-supplier=Digi-Key; ComponentLink4URL: https://datasheet.ciiva.com/1962/ap2141-51-1962221.pdf?src-supplier=Digi-Key; ComponentLink4Description: https://datasheet.ciiva.com/1962/ap2141-51-1962221.pdf?src-supplier=Digi-Key; LCSC Part Number: C500761; Item Type: IC
footprint SOT-23-5
pins: 1 OUT, 2 GND, 3 FLG, 4 EN, 5 IN

## AP2151FMG-7
designator U?
IC PWR SWITCH P-CHANNEL 1:1 6DFN; Manufacturer: Diodes; Manufacturer Part Number: AP2151FMG-7; Number of Channels: 1NUMBER; Value: 120mR; Supplier: Arrow Electronics; LCSC Part Number: C154891; RoHS: Yes; Item Type: IC; Stock: 9000; Pricing: 3000=0.174, 6000=0.1607 (USD); Lead Free: 5697LeadFree; ComponentLink1URL: https://datasheet.ciiva.com/15108/getdatasheetpartid-697404-15108898.pdf?src-supplier=Verical; ComponentLink1Description: https://datasheet.ciiva.com/15108/getdatasheetpartid-697404-15108898.pdf?src-supplier=Verical
footprint UDFN2018-6
pins: 1 GND, 2 IN, 3 EN, 4 FLG, 5 OUT, 6 OUT, 7 EP

## AP2331SA-7
designator U?
IC CURRENT SWITCH SOT23-3; Manufacturer: Diodes; Manufacturer Part Number: AP2331SA-7; Supplier: Digikey; Supplier Part Number: AP2331SA-7DICT-ND; RoHS: Yes; Category: Hot Swap Controllers; Stock: 19607; Pricing: 1=0.45, 10=0.383, 25=0.3572, 100=0.2859, 250=0.26548, 500=0.22464, 1000=0.17359 (USD); ComponentLink1URL: https://datasheet.ciiva.com/15108/getdatasheetpartid-670771-15108880.pdf?src-supplier=Verical; ComponentLink1Description: https://datasheet.ciiva.com/15108/getdatasheetpartid-670771-15108880.pdf?src-supplier=Verical; ComponentLink2URL: https://datasheet.ciiva.com/4923/ap2331-6844-4923636.pdf?src-supplier=Mouser; ComponentLink2Description: https://datasheet.ciiva.com/4923/ap2331-6844-4923636.pdf?src-supplier=Mouser; ComponentLink3URL: https://datasheet.ciiva.com/8142/ap2331-8142774.pdf?src-supplier=Avnet; ComponentLink3Description: https://datasheet.ciiva.com/8142/ap2331-8142774.pdf?src-supplier=Avnet; ComponentLink4URL: https://datasheet.ciiva.com/1962/ap2331-1962167.pdf?src-supplier=Digikey; ComponentLink4Description: https://datasheet.ciiva.com/1962/ap2331-1962167.pdf?src-supplier=Digikey; ComponentLink5URL: https://datasheet.ciiva.com/1962/ap2331-1962168.pdf?src-supplier=Digikey; ComponentLink5Description: https://datasheet.ciiva.com/1962/ap2331-1962168.pdf?src-supplier=Digikey; ComponentLink6URL: https://datasheet.ciiva.com/1962/ap2331-1962169.pdf?src-supplier=Digikey; ComponentLink6Description: https://datasheet.ciiva.com/1962/ap2331-1962169.pdf?src-supplier=Digikey; LCSC Part Number: C500764; Item Type: IC
footprint SOT-23 (TRANS NPN 40V 0.6A SOT23)
pins: 1 GND, 2 OUT, 3 IN

## AP3602AKTR-G1
designator U?
IC LED DRVR RGLTR 100MA SOT23-6; Manufacturer: Diodes; Manufacturer Part Number: AP3602AKTR-G1; Item Type: LED Drivers; Supplier: Digikey; Supplier Part Number: 31-AP3602AKTR-G1CT-ND; RoHS: Yes; Stock: 4893; Pricing: 1=0.48, 10=0.414, 25=0.386, 100=0.3088, 250=0.28676, 500=0.24264, 1000=0.1875 (USD); ComponentLink1URL: https://media.digikey.com/pdf/Data%20Sheets/Diodes%20PDFs/AP3602A_B.pdf?src-supplier=Digikey; ComponentLink1Description: https://media.digikey.com/pdf/Data%20Sheets/Diodes%20PDFs/AP3602A_B.pdf?src-supplier=Digikey; LCSC Part Number: C460358
footprint SOT-23-6
pins: 1 VOUT, 2 GND, 3 ~{SHDN}, 4 C-, 5 VIN, 6 C+

## AP7383-50WR-7
designator U?
IC REG LIN 5V 150MA SOT25 T&R 3K; Manufacturer: Diodes; Manufacturer Part Number: AP7383-50WR-7; Supplier: Digikey; Supplier Part Number: AP7383-50WR-7-ND; RoHS: Yes; Stock: 3000; Pricing: 3000=0.11632, 6000=0.10927, 15000=0.10222, 30000=0.09376, 75000=0.09024 (USD); ComponentLink1URL: https://www.diodes.com/assets/Datasheets/AP7383.pdf?src-supplier=Digikey; ComponentLink1Description: https://www.diodes.com/assets/Datasheets/AP7383.pdf?src-supplier=Digikey; ComponentLink2URL: https://datasheet.octopart.com/AP7383-50WR-7-Diodes-Inc.-datasheet-145414615.pdf?src-supplier=Farnell; ComponentLink2Description: https://datasheet.octopart.com/AP7383-50WR-7-Diodes-Inc.-datasheet-145414615.pdf?src-supplier=Farnell; LCSC Part Number: C460413; Item Type: IC
footprint SOT-23-5
pins: 1 GND, 2 VIN, 3 VOUT, 4 NC, 5 NC

## AP22653W6-7
designator U?
Power Switch/Driver 1:1 P-Channel 2.1A SOT-26; Manufacturer: Diodes; Manufacturer Part Number: AP22653W6-7; Item Type: USB Interface ICs; Interface: On/Off; Fault Protection: Over Voltage,Over Temperature,Short Circuit,Reverse Current; Number of Outputs: 1; Output Configuration: High Side; Max Supply Voltage: 5.5V; Min Supply Voltage: 3V; Number of Channels: 1NUMBER; Supplier: Avnet; LCSC Part Number: C2158037; RoHS: Yes; Stock: 150000; Pricing: 3000=0.1127, 6000=0.11213, 12000=0.11155, 18000=0.11098, 24000=0.1104 (USD); Mounting Technology: Surface Mount; Case/Package: SOT-23-6; Min Operating Temperature: -40°C; Max Operating Temperature: 85°C; Series: -; Max Output current: 2.1A; Output Current: 2.1A; Height: 1.4mm; ComponentLink1URL: https://datasheet.octopart.com/AP22653W6-7-Diodes-Inc.-datasheet-151209788.pdf?src-supplier=Future+Electronics; ComponentLink1Description: https://datasheet.octopart.com/AP22653W6-7-Diodes-Inc.-datasheet-151209788.pdf?src-supplier=Future+Electronics; ComponentLink2URL: https://www.diodes.com/assets/Datasheets/AP22652_53_52A_53A.pdf?src-supplier=Digikey; ComponentLink2Description: https://www.diodes.com/assets/Datasheets/AP22652_53_52A_53A.pdf?src-supplier=Digikey
footprint SOT-26
pins: 1 IN, 2 GND, 3 EN, 4 ~{FAULT}, 5 ILIM, 6 OUT

## AP22816BKAWT-7
designator Q?
USBPOWERSWITCHTSOT25T&R3K; Manufacturer: Diodes; Manufacturer Part Number: AP22816BKAWT-7; Item Type: IC; Number of Channels: 1NUMBER; Supplier: Digikey; Supplier Part Number: 31-AP22816BKAWT-7CT-ND; RoHS: No; Stock: 8685; Pricing: 1=0.31, 10=0.248, 25=0.2264, 100=0.1686, 250=0.15276, 500=0.12644, 1000=0.09483 (USD)
footprint TSOT-25
pins: 1 EN, 2 GND, 3 FLG, 4 IN, 5 OUTT

## AT24C02C-SSHM-T
designator U?
IC EEPROM 2KBIT I2C 1MHZ 8SOIC; Manufacturer: Microchip; Manufacturer Part Number: AT24C02C-SSHM-T; Supplier: Digikey; LCSC Part Number: C6203; RoHS: Yes; Item Type: IC; Pricing: 1=0.25, 100=0.2369 (USD); ComponentLink1URL: https://datasheet.ciiva.com/5700/1626965-5700961.pdf?src-supplier=Farnell; ComponentLink1Description: https://datasheet.ciiva.com/5700/1626965-5700961.pdf?src-supplier=Farnell; ComponentLink2URL: https://datasheet.ciiva.com/15123/getdatasheetpartid-257563-15123318.pdf?src-supplier=Verical; ComponentLink2Description: https://datasheet.ciiva.com/15123/getdatasheetpartid-257563-15123318.pdf?src-supplier=Verical; ComponentLink3URL: https://datasheet.ciiva.com/6614/at24c01c-2c-6614231.pdf?src-supplier=Digikey; ComponentLink3Description: https://datasheet.ciiva.com/6614/at24c01c-2c-6614231.pdf?src-supplier=Digikey; ComponentLink4URL: https://datasheet.ciiva.com/6614/at24c01c-2c-6614232.pdf?src-supplier=Digikey; ComponentLink4Description: https://datasheet.ciiva.com/6614/at24c01c-2c-6614232.pdf?src-supplier=Digikey; ComponentLink5URL: https://datasheet.ciiva.com/6614/at24c01c-2c-6614233.pdf?src-supplier=Digikey; ComponentLink5Description: https://datasheet.ciiva.com/6614/at24c01c-2c-6614233.pdf?src-supplier=Digikey; ComponentLink6URL: https://datasheet.ciiva.com/22729/1626965-22729483.pdf?src-supplier=Element14; ComponentLink6Description: https://datasheet.ciiva.com/22729/1626965-22729483.pdf?src-supplier=Element14; ComponentLink7URL: https://datasheet.ciiva.com/22618/1626965-22618568.pdf?src-supplier=Element14; ComponentLink7Description: https://datasheet.ciiva.com/22618/1626965-22618568.pdf?src-supplier=Element14
footprint SOIC-8(0.154", 3.90mm Width)
pins: 1 A0, 2 A1, 3 A2, 4 GND, 5 SDA, 6 SCL, 7 WP, 8 VCC

## AT24C16D-SSHM-B
designator U?
IC EEPROM 16KBIT I2C 1MHZ 8SOIC; Manufacturer: Microchip; Manufacturer Part Number: AT24C16D-SSHM-B; Supplier: Rs; Supplier Part Number: 2368810; RoHS: Yes; Stock: 1492; Pricing: 1=0.24, 10=0.28, 25=0.27, 50=0.25, 75=0.23 (GBP); ComponentLink1URL: http://www.atmel.com/Images/Atmel-8906-SEEPROM-AT24C16D-Datasheet.pdf?src-supplier=Avnet; ComponentLink1Description: http://www.atmel.com/Images/Atmel-8906-SEEPROM-AT24C16D-Datasheet.pdf?src-supplier=Avnet; ComponentLink2URL: https://datasheet.octopart.com/AT24C16D-SSHM-B-Microchip-datasheet-158237289.pdf?src-supplier=TME; ComponentLink2Description: https://datasheet.octopart.com/AT24C16D-SSHM-B-Microchip-datasheet-158237289.pdf?src-supplier=TME; LCSC Part Number: C615460; Item Type: IC
footprint SOP-8
pins: 1 NC, 2 NC, 3 NC, 4 GND, 5 SDA, 6 SCL, 7 WP, 8 Vcc

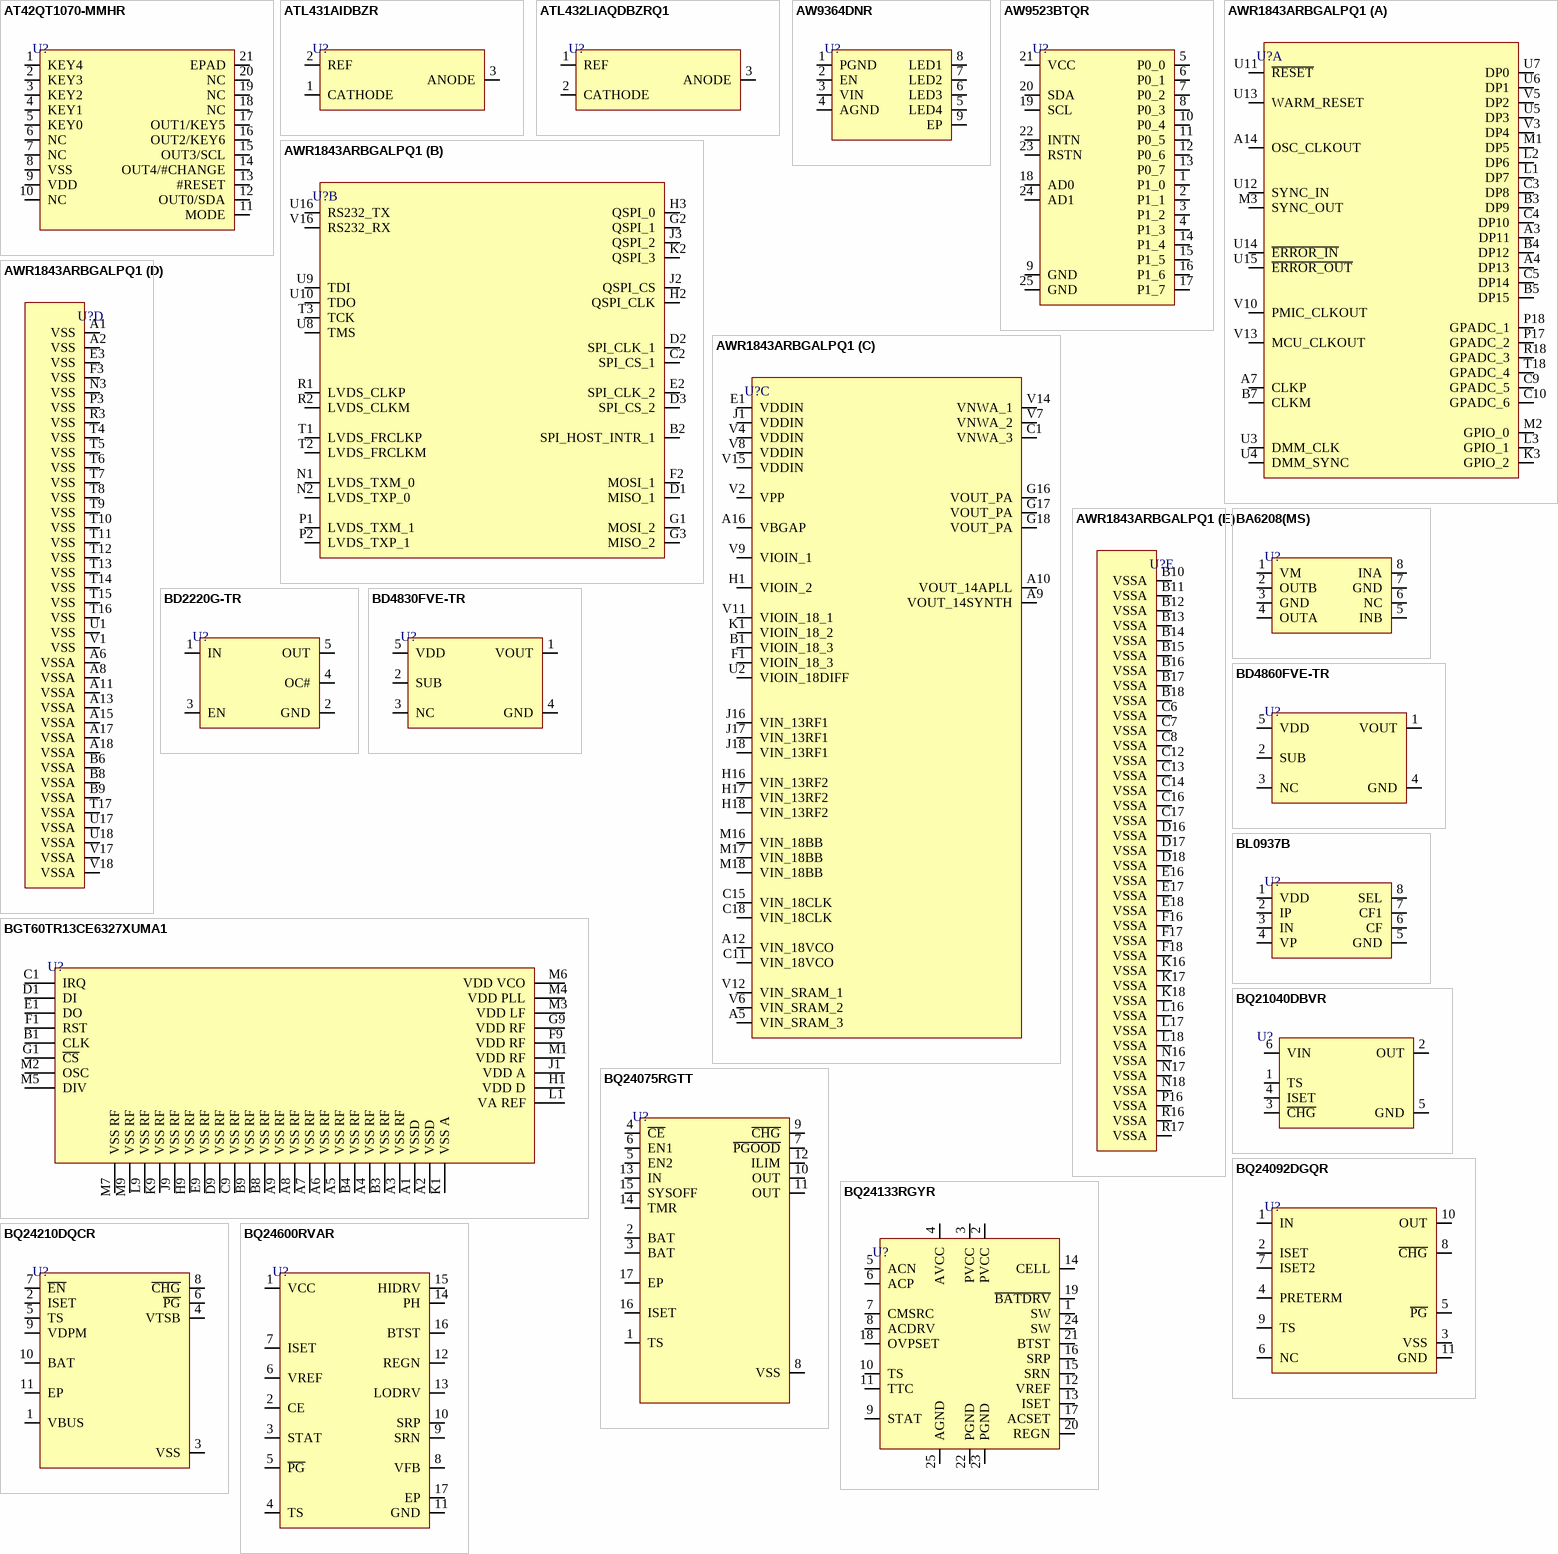
[diagram p1: symbols AT42QT1070-MMHR to BQ24600RVAR]

## AT42QT1070-MMHR
designator U?
IC TOUCH SENSOR 7KEY 20VQFN; Manufacturer: Microchip; Manufacturer Part Number: AT42QT1070-MMHR; Supplier: Mouser; LCSC Part Number: C144195; RoHS: No; Item Type: IC; Stock: 7188; Pricing: 1=1.29, 10=1.28, 50=1.2, 100=1.08, 1000=1.08, 10000=1.07 (USD); ComponentLink1URL: http://www.farnell.com/datasheets/1718762.pdf?src-supplier=Farnell; ComponentLink1Description: http://www.farnell.com/datasheets/1718762.pdf?src-supplier=Farnell; ComponentLink2URL: http://ww1.microchip.com/downloads/en/DeviceDoc/Atmel-9596-AT42-QTouch-BSW-AT42QT1070_Datasheet.pdf?src-supplier=Digikey; ComponentLink2Description: http://ww1.microchip.com/downloads/en/DeviceDoc/Atmel-9596-AT42-QTouch-BSW-AT42QT1070_Datasheet.pdf?src-supplier=Digikey
footprint VQFN-20-EP(3x3)
pins: 1 KEY4, 2 KEY3, 3 KEY2, 4 KEY1, 5 KEY0, 6 NC, 7 NC, 8 VSS, 9 VDD, 10 NC, 11 MODE, 12 OUT0/SDA, 13 #RESET, 14 OUT4/#CHANGE, 15 OUT3/SCL, 16 OUT2/KEY6, 17 OUT1/KEY5, 18 NC, 19 NC, 20 NC, 21 EPAD

## ATL431AIDBZR
designator U?
IC VREF SHUNT ADJ 1% SOT23-3; Manufacturer: Texas Instruments; Manufacturer Part Number: ATL431AIDBZR; Supplier: Mouser; LCSC Part Number: C134067; RoHS: Yes; Item Type: IC; Stock: 1938; Pricing: 1=0.41, 10=0.252, 50=0.252, 100=0.202, 1000=0.184, 10000=0.15 (USD); Length: 2.92mm; Width: 1.3mm; Height: 1.22mm; Thickness: 1mm; Lead Free: 5697LeadFree; ComponentLink1URL: http://www.ti.com/general/docs/lit/getliterature.tsp?genericPartNumber=ATL431&&fileType=pdf&src-supplier=Element14; ComponentLink1Description: http://www.ti.com/general/docs/lit/getliterature.tsp?genericPartNumber=ATL431&&fileType=pdf&src-supplier=Element14; ComponentLink2URL: http://www.ti.com/general/docs/lit/getliterature.tsp?genericPartNumber=ATL431&amp;&amp;fileType=pdf&src-supplier=Element14; ComponentLink2Description: http://www.ti.com/general/docs/lit/getliterature.tsp?genericPartNumber=ATL431&amp;&amp;fileType=pdf&src-supplier=Element14; ComponentLink3URL: http://www.ti.com/lit/ds/symlink/atl431.pdf?src-supplier=Digikey; ComponentLink3Description: http://www.ti.com/lit/ds/symlink/atl431.pdf?src-supplier=Digikey; ComponentLink4URL: http://www.ti.com/general/docs/lit/getliterature.tsp?genericPartNumber=ATL432&&fileType=pdf&src-supplier=Avnet; ComponentLink4Description: http://www.ti.com/general/docs/lit/getliterature.tsp?genericPartNumber=ATL432&&fileType=pdf&src-supplier=Avnet; ComponentLink5URL: http://www.ti.com/general/docs/lit/getliterature.tsp?genericPartNumber=ATL431&&fileType=pdf&src-supplier=Farnell; ComponentLink5Description: http://www.ti.com/general/docs/lit/getliterature.tsp?genericPartNumber=ATL431&&fileType=pdf&src-supplier=Farnell
footprint SOT-23 (TRANS NPN 40V 0.6A SOT23)
pins: 1 CATHODE, 2 REF, 3 ANODE

## ATL432LIAQDBZRQ1
designator U?
IC VREF SHUNT ADJ 1% SOT23-3; Manufacturer: Texas Instruments; Manufacturer Part Number: ATL432LIAQDBZRQ1; Supplier: Digikey; LCSC Part Number: C1852128; RoHS: Yes; Item Type: IC; Stock: 1265; Pricing: 1=0.61, 10=0.523, 25=0.488, 100=0.3903, 250=0.3624, 500=0.30664, 1000=0.23695 (USD); ComponentLink1URL: http://www.ti.com/general/docs/suppproductinfo.tsp?distId=10&amp;gotoUrl=http%3A%2F%2Fwww.ti.com%2Flit%2Fgpn%2Fatl431li-q1&src-supplier=Digikey; ComponentLink1Description: http://www.ti.com/general/docs/suppproductinfo.tsp?distId=10&amp;gotoUrl=http%3A%2F%2Fwww.ti.com%2Flit%2Fgpn%2Fatl431li-q1&src-supplier=Digikey
footprint SOT-23 (TRANS NPN 40V 0.6A SOT23)
pins: 1 REF, 2 CATHODE, 3 ANODE

## AW9364DNR
designator U?
4-Channel 1-wire Dimming LED Driver with Ultra Low Dropout Current Source; Manufacturer: AWINIC(Shanghai Awinic Tech); Manufacturer Part Number: AW9364DNR; Item Type: IC; Package: DFN-8-EP(2x2); LCSC Part Number: C401007; ComponentLink1Description: LCSC; ComponentLink1URL: https://lcsc.com/product-detail/LED-Drivers_AWINIC-Shanghai-Awinic-Tech-AW9364DNR_C401007.html?s_z=n_AW9364
footprint DFN-8-EP(2x2)
pins: 1 PGND, 2 EN, 3 VIN, 4 AGND, 5 LED4, 6 LED3, 7 LED2, 8 LED1, 9 EP

## AW9523BTQR
designator U?
16 400kHz I2C TQFN-24-EP(4x4) I/O Expanders ROHS; Manufacturer: AWINIC; Manufacturer Part Number: AW9523BTQR; Item Type: IC; Package: TQFN-24-EP(4x4); LCSC Part Number: C148077; ComponentLink1Description: LCSC; ComponentLink1URL: https://www.lcsc.com/product-detail/I-O-Expanders_AWINIC-Shanghai-Awinic-Tech-AW9523BTQR_C148077.html
footprint TQFN-24-EP(4x4)
pins: 1 P1_0, 2 P1_1, 3 P1_2, 4 P1_3, 5 P0_0, 6 P0_1, 7 P0_2, 8 P0_3, 9 GND, 10 P0_4, 11 P0_5, 12 P0_6, 13 P0_7, 14 P1_4, 15 P1_5, 16 P1_6, 17 P1_7, 18 AD0, 19 SCL, 20 SDA, 21 VCC, 22 INTN, 23 RSTN, 24 AD1, 25 GND

## AWR1843ARBGALPQ1
designator U?
RF System on a Chip - SoC Single-chip 76-GHz to 81-GHz automotive radar sensor integrating antenna on package, DSP and MCU 180-FCCSP -40 to 125; Manufacturer: Texas Instruments; Manufacturer Part Number: AWR1843ARBGALPQ1; Item Type: IC; Supplier: Mouser; Supplier Part Number: 595-AWR1843ARBGALPQ1; RoHS: No; Category: Integrated Circuits (ICs); Stock: 118; Pricing: 1=46.9, 10=43.76, 50=40.61, 100=37.99, 1000=37.99, 10000=37.99 (USD); Case/Package: 107Case; Pins: 180NUMBER; Length: 15mm; Width: 15mm; Height: 965um; Thickness: 965um
footprint 180-FCBGA (15x15)
part A pins: A3 DP11, A4 DP13, A7 CLKP, A14 OSC_CLKOUT, B3 DP9, B4 DP12, B5 DP15, B7 CLKM, C3 DP8, C4 DP10, C5 DP14, C9 GPADC_5, C10 GPADC_6, K3 GPIO_2, L1 DP7, L2 DP6, L3 GPIO_1, M1 DP5, M2 GPIO_0, M3 SYNC_OUT, P17 GPADC_2, P18 GPADC_1, R18 GPADC_3, T18 GPADC_4, U3 DMM_CLK, U4 DMM_SYNC, U5 DP3, U6 DP1, U7 DP0, U11 ~{RESET}, U12 SYNC_IN, U13 WARM_RESET, U14 ~{ERROR_IN}, U15 ~{ERROR_OUT}, V3 DP4, V5 DP2, V10 PMIC_CLKOUT, V13 MCU_CLKOUT
part B pins: B2 SPI_HOST_INTR_1, C2 SPI_CS_1, D1 MISO_1, D2 SPI_CLK_1, D3 SPI_CS_2, E2 SPI_CLK_2, F2 MOSI_1, G1 MOSI_2, G2 QSPI_1, G3 MISO_2, H2 QSPI_CLK, H3 QSPI_0, J2 QSPI_CS, J3 QSPI_2, K2 QSPI_3, N1 LVDS_TXM_0, N2 LVDS_TXP_0, P1 LVDS_TXM_1, P2 LVDS_TXP_1, R1 LVDS_CLKP, R2 LVDS_CLKM, T1 LVDS_FRCLKP, T2 LVDS_FRCLKM, T3 TCK, U8 TMS, U9 TDI, U10 TDO, U16 RS232_TX, V16 RS232_RX
part C pins: A5 VIN_SRAM_3, A9 VOUT_14SYNTH, A10 VOUT_14APLL, A12 VIN_18VCO, A16 VBGAP, B1 VIOIN_18_3, C1 VNWA_3, C11 VIN_18VCO, C15 VIN_18CLK, C18 VIN_18CLK, E1 VDDIN, F1 VIOIN_18_3, G16 VOUT_PA, G17 VOUT_PA, G18 VOUT_PA, H1 VIOIN_2, H16 VIN_13RF2, H17 VIN_13RF2, H18 VIN_13RF2, J1 VDDIN, J16 VIN_13RF1, J17 VIN_13RF1, J18 VIN_13RF1, K1 VIOIN_18_2, M16 VIN_18BB, M17 VIN_18BB, M18 VIN_18BB, U2 VIOIN_18DIFF, V2 VPP, V4 VDDIN, V6 VIN_SRAM_2, V7 VNWA_2, V8 VDDIN, V9 VIOIN_1, V11 VIOIN_18_1, V12 VIN_SRAM_1, V14 VNWA_1, V15 VDDIN
part D pins: A1 VSS (power), A2 VSS (power), A6 VSSA (power), A8 VSSA (power), A11 VSSA (power), A13 VSSA (power), A15 VSSA (power), A17 VSSA (power), A18 VSSA (power), B6 VSSA (power), B8 VSSA (power), B9 VSSA (power), E3 VSS (power), F3 VSS (power), N3 VSS (power), P3 VSS (power), R3 VSS (power), T4 VSS (power), T5 VSS (power), T6 VSS (power), T7 VSS (power), T8 VSS (power), T9 VSS (power), T10 VSS (power), T11 VSS (power), T12 VSS (power), T13 VSS (power), T14 VSS (power), T15 VSS (power), T16 VSS (power), T17 VSSA (power), U1 VSS (power), U17 VSSA (power), U18 VSSA (power), V1 VSS (power), V17 VSSA (power), V18 VSSA (power)
part E pins: B10 VSSA (power), B11 VSSA (power), B12 VSSA (power), B13 VSSA (power), B14 VSSA (power), B15 VSSA (power), B16 VSSA (power), B17 VSSA (power), B18 VSSA (power), C6 VSSA (power), C7 VSSA (power), C8 VSSA (power), C12 VSSA (power), C13 VSSA (power), C14 VSSA (power), C16 VSSA (power), C17 VSSA (power), D16 VSSA (power), D17 VSSA (power), D18 VSSA (power), E16 VSSA (power), E17 VSSA (power), E18 VSSA (power), F16 VSSA (power), F17 VSSA (power), F18 VSSA (power), K16 VSSA (power), K17 VSSA (power), K18 VSSA (power), L16 VSSA (power), L17 VSSA (power), L18 VSSA (power), N16 VSSA (power), N17 VSSA (power), N18 VSSA (power), P16 VSSA (power), R16 VSSA (power), R17 VSSA (power)

## BA6208(MS)
designator U?
SOIC-8 Brushed DC Motor Drivers ROHS; Manufacturer: MSKSEMI; Manufacturer Part Number: BA6208(MS); Item Type: IC; Package: SOIC-8; LCSC Part Number: C20627211; ComponentLink1Description: LCSC; ComponentLink1URL: https://www.lcsc.com/product-detail/Brushed-DC-Motor-Drivers_MSKSEMI-BA6208-MS_C20627211.html
footprint SOIC-8(0.154", 3.90mm Width)
pins: 1 VM, 2 OUTB, 3 GND, 4 OUTA, 5 INB, 6 NC, 7 GND, 8 INA